# Altium footprint library WR-PHD_Socket Header_2.54mm.PcbLib: 187 footprints (part 9 of 12)
Each footprint in its own frame and in the unit in brackets; x right, y up, seen from the top. Pads: shape width x height; smd on the part's side, far side on the other; paste and mask are expansions set on the pad; w line width, h text height; cw(c..) or ccw(c..) is an arc to the next point about the centre after c.
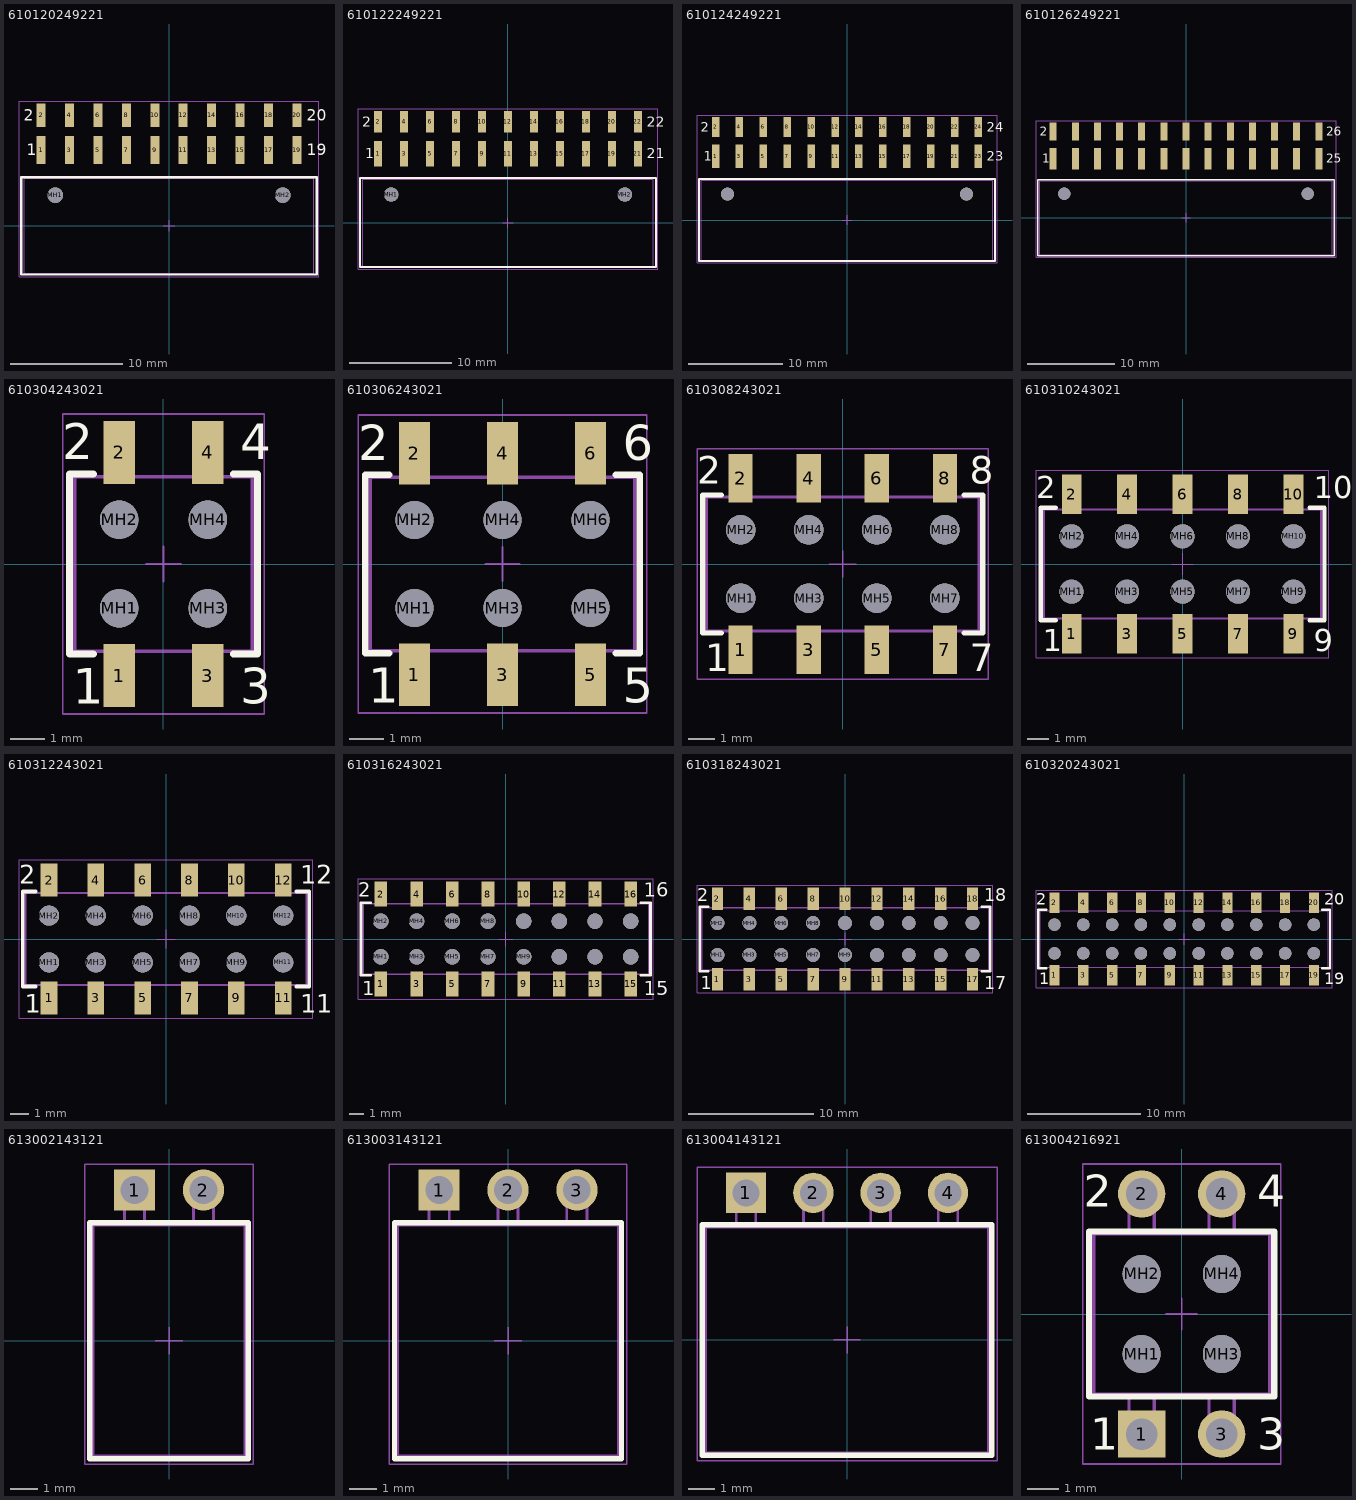
[diagram p8: the footprints below, top view; thin cyan lines are the x and y axes]

## 610120249221 [mm] "Socket Header, Pitch 2.54 mm, SMT, Angled, dual row, 20p"
height 5.2
pads (22):
  rect 0.8x2.5 smd: 1(-11.43,6.76) 3(-8.89,6.76) 5(-6.35,6.76) 7(-3.81,6.76) 9(-1.27,6.76) 11(1.27,6.76) 13(3.81,6.76) 15(6.35,6.76) 17(8.89,6.76) 19(11.43,6.76)
  rect 0.8x2.1 smd: 2(-11.43,9.89) 4(-8.89,9.89) 6(-6.35,9.89) 8(-3.81,9.89) 10(-1.27,9.89) 12(1.27,9.89) 14(3.81,9.89) 16(6.35,9.89) 18(8.89,9.89) 20(11.43,9.89)
  round 1.4 hole 1.4 unplated: MH1(-10.16,2.75) MH2(10.16,2.75)
Top Overlay:
  lines w0.2: -13.2,-4.35 13.2,-4.35 13.2,4.35 -13.2,4.35 -13.2,-4.35
  text "1" at -12.69,6.3 h1.02
  text "2" at -12.99,9.4 h1.02
  text "20" at 12.29,9.4 h1.02
  text "19" at 12.29,6.3 h1.02
Mechanical 13:
  lines w0.1: -12.95,-4.25 -12.95,4.25 12.95,4.25 12.95,-4.25 -12.95,-4.25
Mechanical 15:
  lines w0.05: -0.5,0 0.5,0 ; 0,-0.5 0,0.5 ; -13.4,-4.55 -13.4,11.14 13.4,11.14 13.4,-4.55 -13.4,-4.55
3D body "610120249221.stp": height 5.03, standoff -1.27, extent -12.95,-4.25 12.95,10.44

## 610122249221 [mm] "Socket Header, Pitch 2.54 mm, SMT, Angled, dual row, 22p"
height 5.2
pads (24):
  rect 0.8x2.5 smd: 1(-12.7,6.76) 3(-10.16,6.76) 5(-7.62,6.76) 7(-5.08,6.76) 9(-2.54,6.76) 11(0,6.76) 13(2.54,6.76) 15(5.08,6.76) 17(7.62,6.76) 19(10.16,6.76) 21(12.7,6.76)
  rect 0.8x2.1 smd: 2(-12.7,9.89) 4(-10.16,9.89) 6(-7.62,9.89) 8(-5.08,9.89) 10(-2.54,9.89) 12(0,9.89) 14(2.54,9.89) 16(5.08,9.89) 18(7.62,9.89) 20(10.16,9.89) 22(12.7,9.89)
  round 1.4 hole 1.4 unplated: MH1(-11.43,2.75) MH2(11.43,2.75)
Top Overlay:
  lines w0.2: -14.47,-4.35 14.47,-4.35 14.47,4.35 -14.47,4.35 -14.47,-4.35
  text "21" at 13.56,6.3 h1.02
  text "22" at 13.56,9.4 h1.02
  text "1" at -13.96,6.3 h1.02
  text "2" at -14.26,9.4 h1.02
Mechanical 13:
  lines w0.1: -14.22,-4.25 -14.22,4.25 14.22,4.25 14.22,-4.25 -14.22,-4.25
Mechanical 15:
  lines w0.05: -0.5,0 0.5,0 ; 0,-0.5 0,0.5 ; -14.67,-4.55 -14.67,11.14 14.67,11.14 14.67,-4.55 -14.67,-4.55
3D body "610122249221.stp": height 5.03, standoff -1.27, extent -14.22,-4.25 14.22,10.44

## 610124249221 [mm] "Socket Header, Pitch 2.54 mm, SMT, Angled, dual row, 24p"
height 5.2
pads (26):
  rect 0.8x2.5 smd: 1(-13.97,6.76) 3(-11.43,6.76) 5(-8.89,6.76) 7(-6.35,6.76) 9(-3.81,6.76) 11(-1.27,6.76) 13(1.27,6.76) 15(3.81,6.76) 17(6.35,6.76) 19(8.89,6.76) 21(11.43,6.76) 23(13.97,6.76)
  rect 0.8x2.1 smd: 2(-13.97,9.89) 4(-11.43,9.89) 6(-8.89,9.89) 8(-6.35,9.89) 10(-3.81,9.89) 12(-1.27,9.89) 14(1.27,9.89) 16(3.81,9.89) 18(6.35,9.89) 20(8.89,9.89) 22(11.43,9.89) 24(13.97,9.89)
  round 1.4 hole 1.4 unplated: MH1(-12.7,2.75) MH2(12.7,2.75)
Top Overlay:
  lines w0.2: -15.74,-4.35 15.74,-4.35 15.74,4.35 -15.74,4.35 -15.74,-4.35
  text "1" at -15.23,6.3 h1.02
  text "2" at -15.53,9.4 h1.02
  text "24" at 14.83,9.4 h1.02
  text "23" at 14.83,6.3 h1.02
Mechanical 13:
  lines w0.1: -15.49,-4.25 -15.49,4.25 15.49,4.25 15.49,-4.25 -15.49,-4.25
Mechanical 15:
  lines w0.05: -0.5,0 0.5,0 ; 0,-0.5 0,0.5 ; -15.94,-4.55 -15.94,11.14 15.94,11.14 15.94,-4.55 -15.94,-4.55
3D body "610124249221.stp": height 5.03, standoff -1.27, extent -15.49,-4.25 15.49,10.44

## 610126249221 [mm] "Socket Header, Pitch 2.54 mm, SMT, Angled, dual row, 26p"
height 5.2
pads (28):
  rect 0.8x2.5 smd: 1(-15.24,6.76) 3(-12.7,6.76) 5(-10.16,6.76) 7(-7.62,6.76) 9(-5.08,6.76) 11(-2.54,6.76) 13(0,6.76) 15(2.54,6.76) 17(5.08,6.76) 19(7.62,6.76) 21(10.16,6.76) 23(12.7,6.76) 25(15.24,6.76)
  rect 0.8x2.1 smd: 2(-15.24,9.89) 4(-12.7,9.89) 6(-10.16,9.89) 8(-7.62,9.89) 10(-5.08,9.89) 12(-2.54,9.89) 14(0,9.89) 16(2.54,9.89) 18(5.08,9.89) 20(7.62,9.89) 22(10.16,9.89) 24(12.7,9.89) 26(15.24,9.89)
  round 1.4 hole 1.4 unplated: MH1(-13.97,2.75) MH2(13.97,2.75)
Top Overlay:
  lines w0.2: -17.01,-4.35 17.01,-4.35 17.01,4.35 -17.01,4.35 -17.01,-4.35
  text "1" at -16.5,6.3 h1.02
  text "2" at -16.8,9.4 h1.02
  text "26" at 16.1,9.4 h1.02
  text "25" at 16.1,6.3 h1.02
Mechanical 13:
  lines w0.1: -16.76,-4.25 -16.76,4.25 16.76,4.25 16.76,-4.25 -16.76,-4.25
Mechanical 15:
  lines w0.05: -0.5,0 0.5,0 ; 0,-0.5 0,0.5 ; -17.21,-4.55 -17.21,11.14 17.21,11.14 17.21,-4.55 -17.21,-4.55
3D body "610126249221.stp": height 5.03, standoff -1.27, extent -16.76,-4.25 16.76,10.44

## 610304243021 [mm] "Socket Header, Pitch 2.54 mm, SMT, Vertical, dual row, 4p"
height 3.7
pads (8):
  rect 0.9x1.8 smd: 1(-1.27,-3.2) 2(-1.27,3.2) 3(1.27,-3.2) 4(1.27,3.2)
  round 1.1 hole 1.1 unplated: MH1(-1.27,-1.27) MH2(-1.27,1.27) MH3(1.27,-1.27) MH4(1.27,1.27)
Top Overlay:
  lines w0.2: -2,-2.575 -2.69,-2.575 -2.69,2.575 -2,2.575 ; 2,-2.575 2.69,-2.575 2.69,2.575 2,2.575
  text "2" at -2.9,3 h1.02
  text "4" at 2.2,3 h1.02
  text "3" at 2.2,-4 h1.02
  text "1" at -2.6,-4 h1.02
Mechanical 13:
  lines w0.1: -1.52,-2.5 -1.52,-3.6 -1.02,-3.6 -1.02,-2.5 ; -1.52,2.5 -1.52,3.6 -1.02,3.6 -1.02,2.5 ; 1.02,-2.5 1.02,-3.6 1.52,-3.6 1.52,-2.5 ; 1.02,2.5 1.02,3.6 1.52,3.6 1.52,2.5 ; -2.54,-2.5 -2.54,2.5 2.54,2.5 2.54,-2.5 -2.54,-2.5
Mechanical 15:
  lines w0.05: -0.5,0 0.5,0 ; 0,-0.5 0,0.5 ; -2.89,-4.3 2.89,-4.3 2.89,4.3 -2.89,4.3 -2.89,-4.3
3D body "610304243021.stp": height 4.69, standoff 0, extent -2.54,-3.601 2.54,3.601

## 610306243021 [mm] "Socket Header, Pitch 2.54 mm, SMT, Vertical, dual row, 6p"
height 3.7
pads (12):
  rect 0.9x1.8 smd: 1(-2.54,-3.2) 2(-2.54,3.2) 3(0,-3.2) 4(0,3.2) 5(2.54,-3.2) 6(2.54,3.2)
  round 1.1 hole 1.1 unplated: MH1(-2.54,-1.27) MH2(-2.54,1.27) MH3(0,-1.27) MH4(0,1.27) MH5(2.54,-1.27) MH6(2.54,1.27)
Top Overlay:
  lines w0.2: -3.27,-2.575 -3.96,-2.575 -3.96,2.575 -3.27,2.575 ; 3.27,-2.575 3.96,-2.575 3.96,2.575 3.27,2.575
  text "2" at -4.17,3 h1.02
  text "1" at -3.87,-4 h1.02
  text "6" at 3.47,3 h1.02
  text "5" at 3.47,-4 h1.02
Mechanical 13:
  lines w0.1: -2.79,-2.5 -2.79,-3.6 -2.29,-3.6 -2.29,-2.5 ; -2.79,2.5 -2.79,3.6 -2.29,3.6 -2.29,2.5 ; -0.25,-2.5 -0.25,-3.6 0.25,-3.6 0.25,-2.5 ; -0.25,2.5 -0.25,3.6 0.25,3.6 0.25,2.5 ; 2.29,-2.5 2.29,-3.6 2.79,-3.6 2.79,-2.5 ; 2.29,2.5 2.29,3.6 2.79,3.6 2.79,2.5 ; -3.81,-2.5 -3.81,2.5 3.81,2.5 3.81,-2.5 -3.81,-2.5
Mechanical 15:
  lines w0.05: -0.5,0 0.5,0 ; 0,-0.5 0,0.5 ; -4.16,-4.3 4.16,-4.3 4.16,4.3 -4.16,4.3 -4.16,-4.3
3D body "610306243021.stp": height 4.68, standoff 0, extent -3.81,-3.601 3.81,3.601

## 610308243021 [mm] "Socket Header, Pitch 2.54 mm, SMT, Vertical, dual row, 8p"
height 3.7
pads (16):
  rect 0.9x1.8 smd: 1(-3.81,-3.2) 2(-3.81,3.2) 3(-1.27,-3.2) 4(-1.27,3.2) 5(1.27,-3.2) 6(1.27,3.2) 7(3.81,-3.2) 8(3.81,3.2)
  round 1.1 hole 1.1 unplated: MH1(-3.81,-1.27) MH2(-3.81,1.27) MH3(-1.27,-1.27) MH4(-1.27,1.27) MH5(1.27,-1.27) MH6(1.27,1.27) MH7(3.81,-1.27) MH8(3.81,1.27)
Top Overlay:
  lines w0.2: -4.54,-2.575 -5.23,-2.575 -5.23,2.575 -4.54,2.575 ; 4.54,-2.575 5.23,-2.575 5.23,2.575 4.54,2.575
  text "7" at 4.74,-4 h1.02
  text "8" at 4.74,3 h1.02
  text "1" at -5.14,-4 h1.02
  text "2" at -5.44,3 h1.02
Mechanical 13:
  lines w0.1: -4.06,-2.5 -4.06,-3.6 -3.56,-3.6 -3.56,-2.5 ; -4.06,2.5 -4.06,3.6 -3.56,3.6 -3.56,2.5 ; -1.52,-2.5 -1.52,-3.6 -1.02,-3.6 -1.02,-2.5 ; -1.52,2.5 -1.52,3.6 -1.02,3.6 -1.02,2.5 ; 1.02,-2.5 1.02,-3.6 1.52,-3.6 1.52,-2.5 ; 1.02,2.5 1.02,3.6 1.52,3.6 1.52,2.5 ; 3.56,-2.5 3.56,-3.6 4.06,-3.6 4.06,-2.5 ; 3.56,2.5 3.56,3.6 4.06,3.6 4.06,2.5 ; -5.08,-2.5 5.08,-2.5 5.08,2.5 -5.08,2.5 -5.08,-2.5
Mechanical 15:
  lines w0.05: -0.5,0 0.5,0 ; 0,-0.5 0,0.5 ; -5.43,-4.3 -5.43,4.3 5.43,4.3 5.43,-4.3 -5.43,-4.3
3D body "610308243021.stp": height 4.68, standoff 0, extent -5.08,-3.601 5.08,3.601

## 610310243021 [mm] "Socket Header, Pitch 2.54 mm, SMT, Vertical, dual row, 10p"
height 3.7
pads (20):
  rect 0.9x1.8 smd: 1(-5.08,-3.2) 2(-5.08,3.2) 3(-2.54,-3.2) 4(-2.54,3.2) 5(0,-3.2) 6(0,3.2) 7(2.54,-3.2) 8(2.54,3.2) 9(5.08,-3.2) 10(5.08,3.2)
  round 1.1 hole 1.1 unplated: MH1(-5.08,-1.27) MH2(-5.08,1.27) MH3(-2.54,-1.27) MH4(-2.54,1.27) MH5(0,-1.27) MH6(0,1.27) MH7(2.54,-1.27) MH8(2.54,1.27) MH9(5.08,-1.27) MH10(5.08,1.27)
Top Overlay:
  lines w0.2: -5.81,-2.575 -6.5,-2.575 -6.5,2.575 -5.81,2.575 ; 5.81,-2.575 6.5,-2.575 6.5,2.575 5.81,2.575
  text "1" at -6.41,-4 h1.02
  text "2" at -6.71,3 h1.02
  text "10" at 6.01,3 h1.02
  text "9" at 6.01,-4 h1.02
Mechanical 13:
  lines w0.1: -5.33,-2.5 -5.33,-3.6 -4.83,-3.6 -4.83,-2.5 ; -5.33,2.5 -5.33,3.6 -4.83,3.6 -4.83,2.5 ; -2.79,-2.5 -2.79,-3.6 -2.29,-3.6 -2.29,-2.5 ; -2.79,2.5 -2.79,3.6 -2.29,3.6 -2.29,2.5 ; -0.25,-2.5 -0.25,-3.6 0.25,-3.6 0.25,-2.5 ; -0.25,2.5 -0.25,3.6 0.25,3.6 0.25,2.5 ; 2.29,-2.5 2.29,-3.6 2.79,-3.6 2.79,-2.5 ; 2.29,2.5 2.29,3.6 2.79,3.6 2.79,2.5 ; 4.83,-2.5 4.83,-3.6 5.33,-3.6 5.33,-2.5 ; 4.83,2.5 4.83,3.6 5.33,3.6 5.33,2.5 ; -6.35,-2.5 6.35,-2.5 6.35,2.5 -6.35,2.5 -6.35,-2.5
Mechanical 15:
  lines w0.05: -0.5,0 0.5,0 ; 0,-0.5 0,0.5 ; -6.7,-4.3 -6.7,4.3 6.7,4.3 6.7,-4.3 -6.7,-4.3
3D body "610310243021.stp": height 4.68, standoff 0, extent -6.35,-3.601 6.35,3.601

## 610312243021 [mm] "Socket Header, Pitch 2.54 mm, SMT, Vertical, dual row, 12p"
height 3.7
pads (24):
  rect 0.9x1.8 smd: 1(-6.35,-3.2) 2(-6.35,3.2) 3(-3.81,-3.2) 4(-3.81,3.2) 5(-1.27,-3.2) 6(-1.27,3.2) 7(1.27,-3.2) 8(1.27,3.2) 9(3.81,-3.2) 10(3.81,3.2) 11(6.35,-3.2) 12(6.35,3.2)
  round 1.1 hole 1.1 unplated: MH1(-6.35,-1.27) MH2(-6.35,1.27) MH3(-3.81,-1.27) MH4(-3.81,1.27) MH5(-1.27,-1.27) MH6(-1.27,1.27) MH7(1.27,-1.27) MH8(1.27,1.27) MH9(3.81,-1.27) MH10(3.81,1.27) MH11(6.35,-1.27) MH12(6.35,1.27)
Top Overlay:
  lines w0.2: -7.08,-2.575 -7.77,-2.575 -7.77,2.575 -7.08,2.575 ; 7.08,-2.575 7.77,-2.575 7.77,2.575 7.08,2.575
  text "2" at -7.98,3 h1.02
  text "1" at -7.68,-4 h1.02
  text "12" at 7.28,3 h1.02
  text "11" at 7.28,-4 h1.02
Mechanical 13:
  lines w0.1: -6.6,-2.5 -6.6,-3.6 -6.1,-3.6 -6.1,-2.5 ; -6.6,2.5 -6.6,3.6 -6.1,3.6 -6.1,2.5 ; -4.06,-2.5 -4.06,-3.6 -3.56,-3.6 -3.56,-2.5 ; -4.06,2.5 -4.06,3.6 -3.56,3.6 -3.56,2.5 ; -1.52,-2.5 -1.52,-3.6 -1.02,-3.6 -1.02,-2.5 ; -1.52,2.5 -1.52,3.6 -1.02,3.6 -1.02,2.5 ; 1.02,-2.5 1.02,-3.6 1.52,-3.6 1.52,-2.5 ; 1.02,2.5 1.02,3.6 1.52,3.6 1.52,2.5 ; 3.56,-2.5 3.56,-3.6 4.06,-3.6 4.06,-2.5 ; 3.56,2.5 3.56,3.6 4.06,3.6 4.06,2.5 ; 6.1,-2.5 6.1,-3.6 6.6,-3.6 6.6,-2.5 ; 6.1,2.5 6.1,3.6 6.6,3.6 6.6,2.5 ; -7.62,-2.5 -7.62,2.5 7.62,2.5 7.62,-2.5 -7.62,-2.5
Mechanical 15:
  lines w0.05: -0.5,0 0.5,0 ; 0,-0.5 0,0.5 ; -7.97,-4.3 7.97,-4.3 7.97,4.3 -7.97,4.3 -7.97,-4.3
3D body "610312243021.stp": height 4.68, standoff 0, extent -7.62,-3.601 7.62,3.601

## 610316243021 [mm] "Socket Header, Pitch 2.54 mm, SMT, Vertical, dual row, 16p"
height 3.7
pads (32):
  rect 0.9x1.8 smd: 1(-8.89,-3.2) 2(-8.89,3.2) 3(-6.35,-3.2) 4(-6.35,3.2) 5(-3.81,-3.2) 6(-3.81,3.2) 7(-1.27,-3.2) 8(-1.27,3.2) 9(1.27,-3.2) 10(1.27,3.2) 11(3.81,-3.2) 12(3.81,3.2) 13(6.35,-3.2) 14(6.35,3.2) 15(8.89,-3.2) 16(8.89,3.2)
  round 1.1 hole 1.1 unplated: MH1(-8.89,-1.27) MH2(-8.89,1.27) MH3(-6.35,-1.27) MH4(-6.35,1.27) MH5(-3.81,-1.27) MH6(-3.81,1.27) MH7(-1.27,-1.27) MH8(-1.27,1.27) MH9(1.27,-1.27) MH10(1.27,1.27) MH11(3.81,-1.27) MH12(3.81,1.27) MH13(6.35,-1.27) MH14(6.35,1.27) MH15(8.89,-1.27) MH16(8.89,1.27)
Top Overlay:
  lines w0.2: -9.62,-2.575 -10.31,-2.575 -10.31,2.575 -9.62,2.575 ; 9.62,-2.575 10.31,-2.575 10.31,2.575 9.62,2.575
  text "2" at -10.52,3 h1.02
  text "1" at -10.22,-4 h1.02
  text "16" at 9.82,3 h1.02
  text "15" at 9.82,-4 h1.02
Mechanical 13:
  lines w0.1: -9.14,-2.5 -9.14,-3.6 -8.64,-3.6 -8.64,-2.5 ; -9.14,2.5 -9.14,3.6 -8.64,3.6 -8.64,2.5 ; -6.6,-2.5 -6.6,-3.6 -6.1,-3.6 -6.1,-2.5 ; -6.6,2.5 -6.6,3.6 -6.1,3.6 -6.1,2.5 ; -4.06,-2.5 -4.06,-3.6 -3.56,-3.6 -3.56,-2.5 ; -4.06,2.5 -4.06,3.6 -3.56,3.6 -3.56,2.5 ; -1.52,-2.5 -1.52,-3.6 -1.02,-3.6 -1.02,-2.5 ; -1.52,2.5 -1.52,3.6 -1.02,3.6 -1.02,2.5 ; 1.02,-2.5 1.02,-3.6 1.52,-3.6 1.52,-2.5 ; 1.02,2.5 1.02,3.6 1.52,3.6 1.52,2.5 ; 3.56,-2.5 3.56,-3.6 4.06,-3.6 4.06,-2.5 ; 3.56,2.5 3.56,3.6 4.06,3.6 4.06,2.5 ; 6.1,-2.5 6.1,-3.6 6.6,-3.6 6.6,-2.5 ; 6.1,2.5 6.1,3.6 6.6,3.6 6.6,2.5 ; 8.64,-2.5 8.64,-3.6 9.14,-3.6 9.14,-2.5 ; 8.64,2.5 8.64,3.6 9.14,3.6 9.14,2.5 ; -10.16,-2.5 -10.16,2.5 10.16,2.5 10.16,-2.5 -10.16,-2.5
Mechanical 15:
  lines w0.05: -0.5,0 0.5,0 ; 0,-0.5 0,0.5 ; -10.51,-4.3 10.51,-4.3 10.51,4.3 -10.51,4.3 -10.51,-4.3
3D body "610316243021.stp": height 4.68, standoff 0, extent -10.16,-3.601 10.16,3.601

## 610318243021 [mm] "Socket Header, Pitch 2.54 mm, SMT, Vertical, dual row, 18p"
height 3.7
pads (36):
  rect 0.9x1.8 smd: 1(-10.16,-3.2) 2(-10.16,3.2) 3(-7.62,-3.2) 4(-7.62,3.2) 5(-5.08,-3.2) 6(-5.08,3.2) 7(-2.54,-3.2) 8(-2.54,3.2) 9(0,-3.2) 10(0,3.2) 11(2.54,-3.2) 12(2.54,3.2) 13(5.08,-3.2) 14(5.08,3.2) 15(7.62,-3.2) 16(7.62,3.2) 17(10.16,-3.2) 18(10.16,3.2)
  round 1.1 hole 1.1 unplated: MH1(-10.16,-1.27) MH2(-10.16,1.27) MH3(-7.62,-1.27) MH4(-7.62,1.27) MH5(-5.08,-1.27) MH6(-5.08,1.27) MH7(-2.54,-1.27) MH8(-2.54,1.27) MH9(0,-1.27) MH10(0,1.27) MH11(2.54,-1.27) MH12(2.54,1.27) MH13(5.08,-1.27) MH14(5.08,1.27) MH15(7.62,-1.27) MH16(7.62,1.27) MH17(10.16,-1.27) MH18(10.16,1.27)
Top Overlay:
  lines w0.2: -10.89,-2.575 -11.58,-2.575 -11.58,2.575 -10.89,2.575 ; 10.89,-2.575 11.58,-2.575 11.58,2.575 10.89,2.575
  text "1" at -11.49,-4 h1.02
  text "2" at -11.79,3 h1.02
  text "18" at 11.09,3 h1.02
  text "17" at 11.09,-4 h1.02
Mechanical 13:
  lines w0.1: -10.41,-2.5 -10.41,-3.6 -9.91,-3.6 -9.91,-2.5 ; -10.41,2.5 -10.41,3.6 -9.91,3.6 -9.91,2.5 ; -7.87,-2.5 -7.87,-3.6 -7.37,-3.6 -7.37,-2.5 ; -7.87,2.5 -7.87,3.6 -7.37,3.6 -7.37,2.5 ; -5.33,-2.5 -5.33,-3.6 -4.83,-3.6 -4.83,-2.5 ; -5.33,2.5 -5.33,3.6 -4.83,3.6 -4.83,2.5 ; -2.79,-2.5 -2.79,-3.6 -2.29,-3.6 -2.29,-2.5 ; -2.79,2.5 -2.79,3.6 -2.29,3.6 -2.29,2.5 ; -0.25,-2.5 -0.25,-3.6 0.25,-3.6 0.25,-2.5 ; -0.25,2.5 -0.25,3.6 0.25,3.6 0.25,2.5 ; 2.29,-2.5 2.29,-3.6 2.79,-3.6 2.79,-2.5 ; 2.29,2.5 2.29,3.6 2.79,3.6 2.79,2.5 ; 4.83,-2.5 4.83,-3.6 5.33,-3.6 5.33,-2.5 ; 4.83,2.5 4.83,3.6 5.33,3.6 5.33,2.5 ; 7.37,-2.5 7.37,-3.6 7.87,-3.6 7.87,-2.5 ; 7.37,2.5 7.37,3.6 7.87,3.6 7.87,2.5 ; 9.91,-2.5 9.91,-3.6 10.41,-3.6 10.41,-2.5 ; 9.91,2.5 9.91,3.6 10.41,3.6 10.41,2.5 ; -11.43,-2.5 11.43,-2.5 11.43,2.5 -11.43,2.5 -11.43,-2.5
Mechanical 15:
  lines w0.05: -0.5,0 0.5,0 ; 0,-0.5 0,0.5 ; -11.78,-4.3 -11.78,4.3 11.78,4.3 11.78,-4.3 -11.78,-4.3
3D body "610318243021.stp": height 4.68, standoff 0, extent -11.43,-3.601 11.43,3.601

## 610320243021 [mm] "Socket Header, Pitch 2.54 mm, SMT, Vertical, dual row, 20p"
height 3.7
pads (40):
  rect 0.9x1.8 smd: 1(-11.43,-3.2) 2(-11.43,3.2) 3(-8.89,-3.2) 4(-8.89,3.2) 5(-6.35,-3.2) 6(-6.35,3.2) 7(-3.81,-3.2) 8(-3.81,3.2) 9(-1.27,-3.2) 10(-1.27,3.2) 11(1.27,-3.2) 12(1.27,3.2) 13(3.81,-3.2) 14(3.81,3.2) 15(6.35,-3.2) 16(6.35,3.2) 17(8.89,-3.2) 18(8.89,3.2) 19(11.43,-3.2) 20(11.43,3.2)
  round 1.1 hole 1.1 unplated: MH1(-11.43,-1.27) MH2(-11.43,1.27) MH3(-8.89,-1.27) MH4(-8.89,1.27) MH5(-6.35,-1.27) MH6(-6.35,1.27) MH7(-3.81,-1.27) MH8(-3.81,1.27) MH9(-1.27,-1.27) MH10(-1.27,1.27) MH11(1.27,-1.27) MH12(1.27,1.27) MH13(3.81,-1.27) MH14(3.81,1.27) MH15(6.35,-1.27) MH16(6.35,1.27) MH17(8.89,-1.27) MH18(8.89,1.27) MH19(11.43,-1.27) MH20(11.43,1.27)
Top Overlay:
  lines w0.2: -12.16,-2.575 -12.85,-2.575 -12.85,2.575 -12.16,2.575 ; 12.16,-2.575 12.85,-2.575 12.85,2.575 12.16,2.575
  text "19" at 12.36,-4 h1.02
  text "20" at 12.36,3 h1.02
  text "1" at -12.76,-4 h1.02
  text "2" at -13.06,3 h1.02
Mechanical 13:
  lines w0.1: -11.68,-2.5 -11.68,-3.6 -11.18,-3.6 -11.18,-2.5 ; -11.68,2.5 -11.68,3.6 -11.18,3.6 -11.18,2.5 ; -9.14,-2.5 -9.14,-3.6 -8.64,-3.6 -8.64,-2.5 ; -9.14,2.5 -9.14,3.6 -8.64,3.6 -8.64,2.5 ; -6.6,-2.5 -6.6,-3.6 -6.1,-3.6 -6.1,-2.5 ; -6.6,2.5 -6.6,3.6 -6.1,3.6 -6.1,2.5 ; -4.06,-2.5 -4.06,-3.6 -3.56,-3.6 -3.56,-2.5 ; -4.06,2.5 -4.06,3.6 -3.56,3.6 -3.56,2.5 ; -1.52,-2.5 -1.52,-3.6 -1.02,-3.6 -1.02,-2.5 ; -1.52,2.5 -1.52,3.6 -1.02,3.6 -1.02,2.5 ; 1.02,-2.5 1.02,-3.6 1.52,-3.6 1.52,-2.5 ; 1.02,2.5 1.02,3.6 1.52,3.6 1.52,2.5 ; 3.56,-2.5 3.56,-3.6 4.06,-3.6 4.06,-2.5 ; 3.56,2.5 3.56,3.6 4.06,3.6 4.06,2.5 ; 6.1,-2.5 6.1,-3.6 6.6,-3.6 6.6,-2.5 ; 6.1,2.5 6.1,3.6 6.6,3.6 6.6,2.5 ; 8.64,-2.5 8.64,-3.6 9.14,-3.6 9.14,-2.5 ; 8.64,2.5 8.64,3.6 9.14,3.6 9.14,2.5 ; 11.18,-2.5 11.18,-3.6 11.68,-3.6 11.68,-2.5 ; 11.18,2.5 11.18,3.6 11.68,3.6 11.68,2.5 ; -12.7,-2.5 12.7,-2.5 12.7,2.5 -12.7,2.5 -12.7,-2.5
Mechanical 15:
  lines w0.05: -0.5,0 0.5,0 ; 0,-0.5 0,0.5 ; -13.05,-4.3 -13.05,4.3 13.05,4.3 13.05,-4.3 -13.05,-4.3
3D body "610320243021.stp": height 4.68, standoff 0, extent -12.7,-3.601 12.7,3.601

## 613002143121 [mm] "Socket Header, Pitch 2.54 mm, THT, Angled, single row, 2p"
height 2.5
pads (2):
  rect 1.52x1.52 hole 1.02: 1(-1.27,5.55)
  round 1.52 hole 1.02: 2(1.27,5.55)
Top Overlay:
  lines w0.2: -2.915,-4.35 -2.915,4.35 2.915,4.35 2.915,-4.35 -2.915,-4.35
Mechanical 13:
  lines w0.1: -1.64,4.25 -1.64,5.75 -0.9,5.75 -0.9,4.25 ; 0.9,4.25 0.9,5.75 1.64,5.75 1.64,4.25 ; -2.79,-4.25 -2.79,4.25 2.79,4.25 2.79,-4.25 -2.79,-4.25
Mechanical 15:
  lines w0.05: -0.5,0 0.5,0 ; 0,-0.5 0,0.5 ; -3.115,-4.55 3.115,-4.55 3.115,6.51 -3.115,6.51 -3.115,-4.55
3D body "613002143121.stp": height 2.55, standoff -3.04, extent -2.79,-4.25 2.79,5.75

## 613003143121 [mm] "Socket Header, Pitch 2.54 mm, THT, Angled, single row, 3p"
height 2.5
pads (3):
  rect 1.52x1.52 hole 1.02: 1(-2.54,5.55)
  round 1.52 hole 1.02: 2(0,5.55) 3(2.54,5.55)
Top Overlay:
  lines w0.2: -4.185,-4.35 -4.185,4.35 4.185,4.35 4.185,-4.35 -4.185,-4.35
Mechanical 13:
  lines w0.1: -2.91,4.25 -2.91,5.75 -2.17,5.75 -2.17,4.25 ; -0.37,4.25 -0.37,5.75 0.37,5.75 0.37,4.25 ; 2.17,4.25 2.17,5.75 2.91,5.75 2.91,4.25 ; -4.06,-4.25 -4.06,4.25 4.06,4.25 4.06,-4.25 -4.06,-4.25
Mechanical 15:
  lines w0.05: -0.5,0 0.5,0 ; 0,-0.5 0,0.5 ; -4.385,-4.55 4.385,-4.55 4.385,6.51 -4.385,6.51 -4.385,-4.55
3D body "613003143121.stp": height 2.55, standoff -3.04, extent -4.06,-4.25 4.06,5.75

## 613004143121 [mm] "Socket Header, Pitch 2.54 mm, THT, Angled, single row, 4p"
height 2.5
pads (4):
  rect 1.52x1.52 hole 1.02: 1(-3.81,5.55)
  round 1.52 hole 1.02: 2(-1.27,5.55) 3(1.27,5.55) 4(3.81,5.55)
Top Overlay:
  lines w0.2: -5.455,-4.35 -5.455,4.35 5.455,4.35 5.455,-4.35 -5.455,-4.35
Mechanical 13:
  lines w0.1: -4.18,4.25 -4.18,5.75 -3.44,5.75 -3.44,4.25 ; -1.64,4.25 -1.64,5.75 -0.9,5.75 -0.9,4.25 ; 0.9,4.25 0.9,5.75 1.64,5.75 1.64,4.25 ; 3.44,4.25 3.44,5.75 4.18,5.75 4.18,4.25 ; -5.33,-4.25 -5.33,4.25 5.33,4.25 5.33,-4.25 -5.33,-4.25
Mechanical 15:
  lines w0.05: -0.5,0 0.5,0 ; 0,-0.5 0,0.5 ; -5.655,-4.55 5.655,-4.55 5.655,6.51 -5.655,6.51 -5.655,-4.55
3D body "613004143121.stp": height 2.55, standoff -3.04, extent -5.33,-4.25 5.33,5.75

## 613004216921 [mm] "Socket Header, Pitch 2.54 mm, THT, Vertical, dual row, 4p"
height 5
pads (8):
  rect 1.5x1.5 hole 1: 1(-1.27,-3.81)
  round 1.5 hole 1: 2(-1.27,3.81) 3(1.27,-3.81) 4(1.27,3.81)
  round 1.2 hole 1.2 unplated: MH1(-1.27,-1.27) MH2(-1.27,1.27) MH3(1.27,-1.27) MH4(1.27,1.27)
Top Overlay:
  lines w0.2: -2.94,-2.615 2.94,-2.615 2.94,2.615 -2.94,2.615 -2.94,-2.615
  text "1" at -2.9,-4.3 h1.02
  text "3" at 2.4,-4.3 h1.02
  text "4" at 2.4,3.4 h1.02
  text "2" at -3.1,3.4 h1.02
Mechanical 13:
  lines w0.1: -1.67,-2.54 -1.67,-3.935 -0.87,-3.935 -0.87,-2.54 ; -1.67,2.54 -1.67,3.935 -0.87,3.935 -0.87,2.54 ; 0.87,-2.54 0.87,-3.935 1.67,-3.935 1.67,-2.54 ; 0.87,2.54 0.87,3.935 1.67,3.935 1.67,2.54 ; -2.79,-2.54 -2.79,2.54 2.79,2.54 2.79,-2.54 -2.79,-2.54
Mechanical 15:
  lines w0.05: -0.5,0 0.5,0 ; 0,-0.5 0,0.5 ; -3.14,-4.76 3.14,-4.76 3.14,4.76 -3.14,4.76 -3.14,-4.76
3D body "613004216921.stp": height 5.02, standoff -3.08, extent -2.79,-3.935 2.79,3.935